# Altium footprint library Fuse$.PcbLib: 21 footprints (part 2 of 2)
Each footprint in its own frame and in the unit in brackets; x right, y up, seen from the top. Pads: shape width x height; smd on the part's side, far side on the other; paste and mask are expansions set on the pad; w line width, h text height; cw(c..) or ccw(c..) is an arc to the next point about the centre after c.
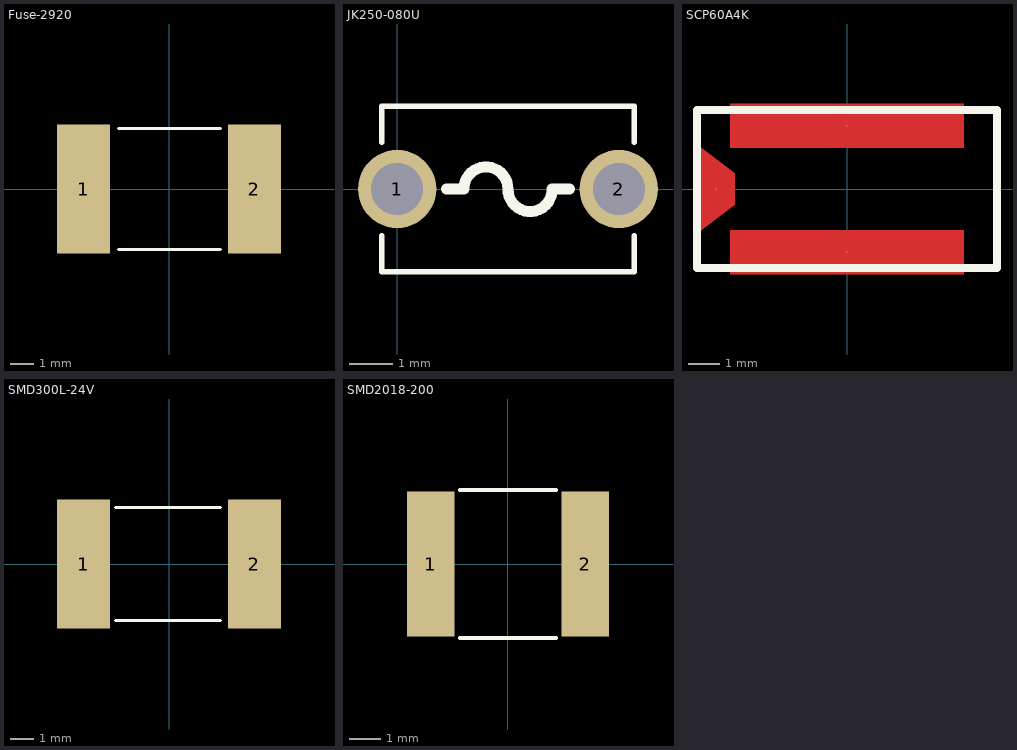
[diagram p1: the footprints below, top view; thin cyan lines are the x and y axes]

## Fuse-2920 [mm]
pads (2):
  rect 2.3x5.6 smd: 1(-3.7,0) 2(3.7,0)
Top Overlay:
  lines w0.127: -2.184,-2.616 2.235,-2.616 ; -2.184,2.616 2.235,2.616
3D body "User Library-Fuse 2920.step": height 0.9, standoff 0, extent -3.68,-2.56 3.68,2.56

## JK250-080U [mm]
pads (2):
  round 1.8 hole 1.2 paste-2539.97 mask+0.051: 1(0,0) 2(5.1,0)
Top Overlay:
  lines w0.127: -0.35,-1.076 -0.35,-1.9 5.45,-1.9 5.45,-1.076 ; -0.35,1.076 -0.35,1.9 5.45,1.9 5.45,1.076
  lines w0.254: 1.131,0 1.534,0 cw(c2.042,0) 2.55,0 ccw(c3.058,-0.009) 3.566,0 3.969,0

## SCP60A4K [mil]
pads (3):
  round 1 smd: 1(0,78.71) 2(-163.39,0) 3(0,-78.71)
Top Layer:
  region: -145.67,-106.27 145.67,-106.27 145.67,-51.15 -145.67,-51.15
  region: -187.01,-55.12 -139.76,-19.68 -139.76,19.68 -187.01,55.12
  region: -145.67,51.15 -145.67,106.27 145.67,106.27 145.67,51.15
Top Overlay:
  lines w10: -187.01,-98.43 187.01,-98.43 187.01,98.43 -187.01,98.43 -187.01,-98.43
3D body: height 78.74, standoff 0, extent -187.01,-98.43 187.01,98.43

## SMD300L-24V [mm] "24V 3A 100A 1.5W 6A -40?~+85? 0.012O 20s 0.048O SMD,6.73x4.8x0.6mm"
pads (2):
  rect 2.3x5.6 smd: 1(-3.7,0) 2(3.7,0)
Top Overlay:
  lines w0.127: -2.309,-2.441 2.237,-2.441 ; -2.309,2.441 2.237,2.441
3D body "SMD300L-24V.STEP": height 0.7, standoff 0, extent -3.365,-2.4 3.365,2.4

## SMD2018-200 [mm]
pads (2):
  rect 1.5x4.6 smd: 1(-2.45,0) 2(2.45,0)
Top Overlay:
  lines w0.127: -1.524,-2.337 1.524,-2.337 ; -1.524,2.337 1.524,2.337
3D body "SMD2018-200.STEP": height 0.62, standoff 0, extent -2.46,-2.31 2.46,2.31